# Altium schematic symbol library W25Q128JVBIQ.SchLib: 1 symbol
Pins are listed as number, name and electrical type; pins without a type are passive.

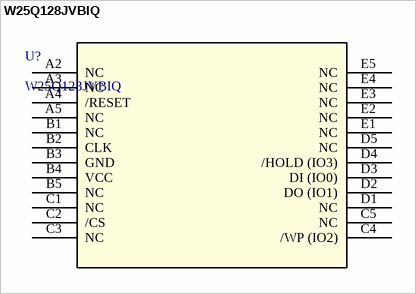
[diagram p0: symbol W25Q128JVBIQ]

## W25Q128JVBIQ
designator U?
No Description Available; Manufacturer_Name: Winbond; Type: Memory; Copyright: Copyright (C) 2026 Ultra Librarian. All rights reserved.; Manufacturer_Part_Number: W25Q128JVBIQ; RefDes: RefDes
footprint TFBGA_128JVBIQ_WIN
pins: A2 NC, A3 NC, A4 /RESET, A5 NC, B1 NC, B2 CLK, B3 GND (power), B4 VCC (power), B5 NC, C1 NC, C2 /CS, C3 NC, C4 /WP (IO2), C5 NC, D1 NC, D2 DO (IO1), D3 DI (IO0), D4 /HOLD (IO3), D5 NC, E1 NC, E2 NC, E3 NC, E4 NC, E5 NC